# Altium footprint library CVCO55BE04000800.PcbLib: 1 footprints
Each footprint in its own frame and in the unit in brackets; x right, y up, seen from the top. Pads: shape width x height; smd on the part's side, far side on the other; paste and mask are expansions set on the pad; w line width, h text height; cw(c..) or ccw(c..) is an arc to the next point about the centre after c.
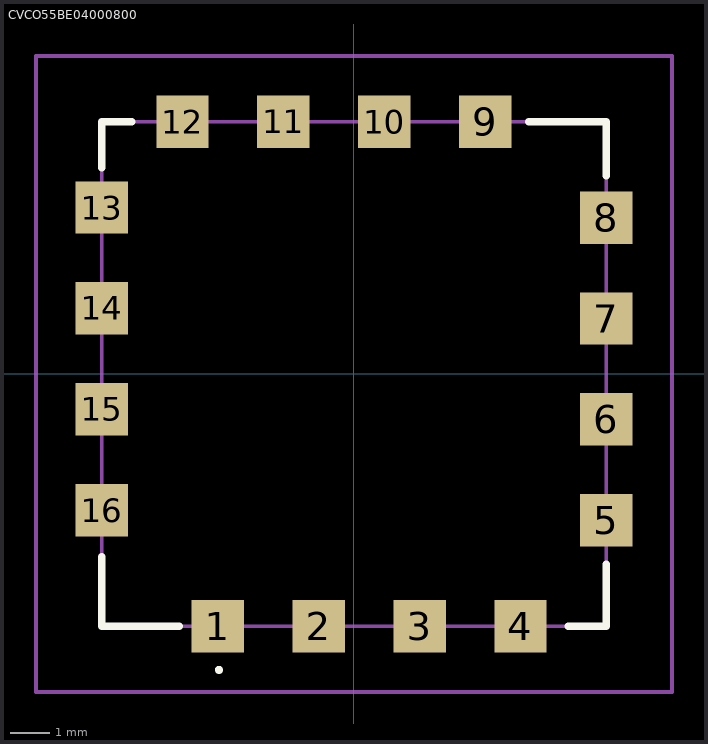
[diagram p0: the footprint, top view; thin cyan lines are the x and y axes]

## CVCO55BE04000800 [mm]
pads (16):
  rect 1.32x1.32 smd: 1(-3.429,-6.35) 2(-0.889,-6.35) 3(1.651,-6.35) 4(4.191,-6.35) 5(6.35,-3.683) 6(6.35,-1.143) 7(6.35,1.397) 8(6.35,3.937) 9(3.302,6.35) 10(0.762,6.35) 11(-1.778,6.35) 12(-4.318,6.35) 13(-6.35,4.191) 14(-6.35,1.651) 15(-6.35,-0.889) 16(-6.35,-3.429)
Top Overlay:
  lines w0.1: -3.4,-7.5 cw(c-3.4,-7.45) -3.4,-7.4 ; -3.4,-7.5 -3.4,-7.5 ; -3.4,-7.5 ccw(c-3.4,-7.45) -3.4,-7.4 ; -3.4,-7.4 -3.4,-7.4
  lines w0.2: -6.35,-4.6 -6.35,-6.35 -4.4,-6.35 ; -6.35,5.2 -6.35,6.35 -5.6,6.35 ; 4.4,6.35 6.35,6.35 6.35,5 ; 5.4,-6.35 6.35,-6.35 6.35,-4.8
Mechanical 15:
  lines w0.1: -6.35,-6.35 6.35,-6.35 6.35,6.35 -6.35,6.35 -6.35,-6.35
Mechanical 20:
  lines w0.1: -8.01,-8.01 8.01,-8.01 8.01,8.01 -8.01,8.01 -8.01,-8.01